# Altium schematic symbol library Resistor.SchLib: 292 symbols
Pins are listed as number, name and electrical type; pins without a type are passive.

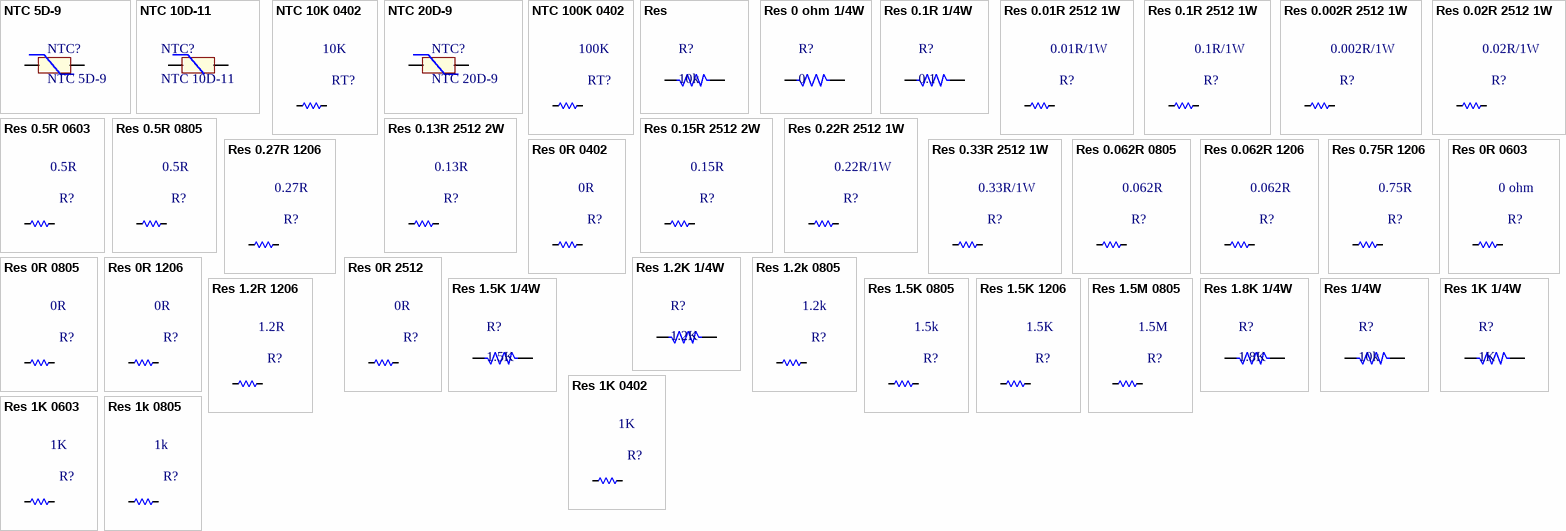
[diagram p0: symbols NTC 5D-9 to Res 1k 0805]

## NTC 5D-9
designator NTC?
NTC Thermistor; Code: 1020-008; ComponentLink1Description: Datasheet; ComponentLink1URL: https://datasheet.lcsc.com/szlcsc/NTC-Thermistor-5R_C69391.pdf
footprint NTC 5D-9
pins: 1, 2

## NTC 10D-11
designator NTC?
NTC Thermistor; Code: N/A
footprint NTC xxD11
pins: 1, 2

## NTC 10K 0402
designator RT?, comment 10K
Resistor SMD 0402; Code: N/A
footprint RES-SMD-0402
pins: 1, 2

## NTC 20D-9
designator NTC?
NTC Thermistor; Code: N/A
footprint NTC 5D-9
pins: 1, 2

## NTC 100K 0402
designator RT?, comment 100K
Resistor SMD 0402; Code: N/A
footprint RES-SMD-0402
pins: 1, 2

## Res
designator R?, comment 10k
Res; Value: R1/4W - 1K
footprint RES_1/4 W
footprint RES-1/2W
footprint RES-1W
footprint RES-5W (R5W , 2 pin, 400 x 950mil)
footprint RES-1/4WD
footprint RES-1/4W-SMALL
footprint RES-1/4W
footprint RES_2W
footprint RES_3W (R2W, 2 pin, 700mil)
footprint RES-SMD-2512 -2010 (Chip Capacitor, Body 3.2x2.5mm, IPC Medium Density)
pins: 1, 2

## Res 0 ohm 1/4W
designator R?, comment 0
Res 1/4W 0 ohm; Designed by: Nhox; Code: N/A
footprint RES-1/4WD
footprint RES-1/4W
pins: 1, 2

## Res 0.1R 1/4W
designator R?, comment 0.1
Res 1/4W 0.1ohm 1%; Designed by: Nhox; Code: N/A
footprint RES_1/4 W 1.2K
pins: 1, 2

## Res 0.01R 2512 1W
designator R?, comment 0.01R/1W
Resistor SMD 2512 1W; Code: N/A
footprint RES-SMD-2512 (Chip Capacitor, Body 3.2x2.5mm, IPC Medium Density)
pins: 1, 2

## Res 0.1R 2512 1W
designator R?, comment 0.1R/1W
Resistor SMD 2512 1W; Code: N/A
footprint RES-SMD-2512 (Chip Capacitor, Body 3.2x2.5mm, IPC Medium Density)
pins: 1, 2

## Res 0.002R 2512 1W
designator R?, comment 0.002R/1W
Resistor SMD 2512 1W; Code: N/A
footprint RES-SMD-2512 (Chip Capacitor, Body 3.2x2.5mm, IPC Medium Density)
pins: 1, 2

## Res 0.02R 2512 1W
designator R?, comment 0.02R/1W
Resistor SMD 2512 1W; Code: N/A
footprint RES-SMD-2512 (Chip Capacitor, Body 3.2x2.5mm, IPC Medium Density)
pins: 1, 2

## Res 0.5R 0603
designator R?, comment 0.5R
Resistor SMD 0603; Code: N/A
footprint RES-SMD-0603
pins: 1, 2

## Res 0.5R 0805
designator R?, comment 0.5R
Resistor SMD 0805; Code: N/A
footprint RES-SMD-0805
pins: 1, 2

## Res 0.13R 2512 2W
designator R?, comment 0.13R
Resistor SMD 2512; Code: N/A; LCSC Part: C395974
footprint RES-SMD-2512 (Chip Capacitor, Body 3.2x2.5mm, IPC Medium Density)
pins: 1, 2

## Res 0.15R 2512 2W
designator R?, comment 0.15R
Resistor SMD 2512; Code: N/A; LCSC Part: C459673
footprint RES-SMD-2512 (Chip Capacitor, Body 3.2x2.5mm, IPC Medium Density)
pins: 1, 2

## Res 0.22R 2512 1W
designator R?, comment 0.22R/1W
Resistor SMD 2512 1W; Code: 1032-005
footprint RES-SMD-2512 (Chip Capacitor, Body 3.2x2.5mm, IPC Medium Density)
pins: 1, 2

## Res 0.27R 1206
designator R?, comment 0.27R
Resistor SMD 1206; Code: 1030-006
footprint RES-SMD-1206
pins: 1, 2

## Res 0.33R 2512 1W
designator R?, comment 0.33R/1W
Resistor SMD 2512 1W; Code: 1032-007
footprint RES-SMD-2512 (Chip Capacitor, Body 3.2x2.5mm, IPC Medium Density)
pins: 1, 2

## Res 0.062R 0805
designator R?, comment 0.062R
Resistor SMD 0805
footprint RES-SMD-0805
pins: 1, 2

## Res 0.062R 1206
designator R?, comment 0.062R
Resistor SMD 1206; Code: 1030-014
footprint RES-SMD-1206
pins: 1, 2

## Res 0.75R 1206
designator R?, comment 0.75R
Resistor SMD 1206; Code: 1030-014
footprint RES-SMD-1206
pins: 1, 2

## Res 0R 0402
designator R?, comment 0R
Resistor SMD 0402; Code: 1022-001
footprint RES-SMD-0402
pins: 1, 2

## Res 0R 0603
designator R?, comment 0 ohm
Resistor SMD 0603; Code: 1028-001
footprint RES-SMD-0603
pins: 1, 2

## Res 0R 0805
designator R?, comment 0R
Resistor SMD 0805; Code: 1024-220
footprint RES-SMD-0805
pins: 1, 2

## Res 0R 1206
designator R?, comment 0R
Resistor SMD 1206; Code: 1030-001
footprint RES-SMD-1206
pins: 1, 2

## Res 0R 2512
designator R?, comment 0R
Resistor SMD 2512, R005, 0 ohm; Code: 1032-001
footprint RES-SMD-2512 (Chip Capacitor, Body 3.2x2.5mm, IPC Medium Density)
pins: 1, 2

## Res 1.2K 1/4W
designator R?, comment 1.2K
Res 1/4W 1.2K 1%; Code: 1001-055; Designed by: TranLuyen
footprint RES_1/4 W 1.2K
pins: 1, 2

## Res 1.2k 0805
designator R?, comment 1.2k
Resistor SMD 0805; Code: 1024-088
footprint RES-SMD-0805
pins: 1, 2

## Res 1.2R 1206
designator R?, comment 1.2R
Resistor SMD 1206; Code: 1030-018
footprint RES-SMD-1206
pins: 1, 2

## Res 1.5K 1/4W
designator R?, comment 1.5K
Res 1/4W 1.5K 1%; Code: 1001-056; Designed by: TranLuyen
footprint RES_1/4 W 1.5K
pins: 1, 2

## Res 1.5K 0805
designator R?, comment 1.5k
Resistor SMD 0805; Code: 1024-090; Value: 1.5k
footprint RES-SMD-0805
pins: 1, 2

## Res 1.5K 1206
designator R?, comment 1.5K
Resistor SMD 1206; Code: 1031-090; Value: 1.5K
footprint RES-SMD-1206
pins: 1, 2

## Res 1.5M 0805
designator R?, comment 1.5M
Resistor SMD 0805; Code: 1024-166
footprint RES-SMD-0805
pins: 1, 2

## Res 1.8K 1/4W
designator R?, comment 1.8K
Res 1/4W 1.8K 1%; Code: 1001-057; Designed by: TranLuyen
footprint RES_1/4 W 1.8K
pins: 1, 2

## Res 1/4W
designator R?, comment 10k
Res 1/4W; Code: N/A
footprint RES_1/4 W
footprint RES-1/4WD
footprint RES-1/4W-SMALL
footprint RES-1/4W
pins: 1, 2

## Res 1K 1/4W
designator R?, comment 1K
Res 1/4W; Designed by: TranLuyen; Code: 1001-054
footprint RES_1/4 W 1K
footprint RES-1/4WD
pins: 1, 2

## Res 1K 0402
designator R?, comment 1K
Resistor SMD 0402; Code: 1022-086
footprint RES-SMD-0402
pins: 1, 2

## Res 1K 0603
designator R?, comment 1K
Resistor SMD 0603; Code: 1028-086
footprint RES-SMD-0603
pins: 1, 2

## Res 1k 0805
designator R?, comment 1k
Resistor SMD 0805; Code: 1024-086
footprint RES-SMD-0805
pins: 1, 2

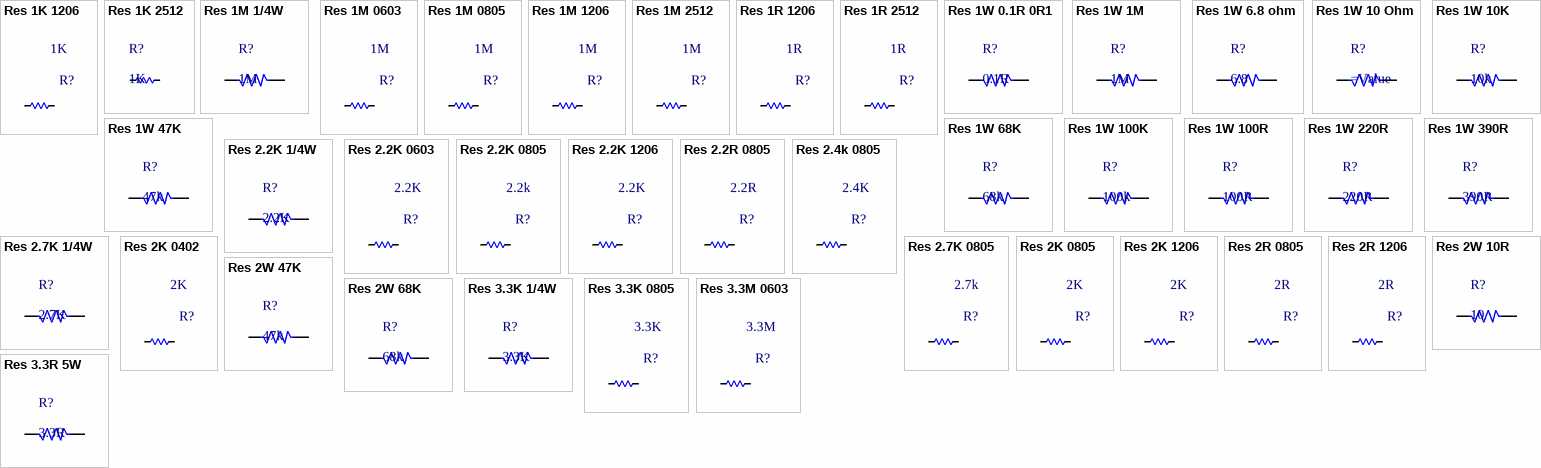
[diagram p1: symbols Res 1K 1206 to Res 3.3R 5W]

## Res 1K 1206
designator R?, comment 1K
Resistor SMD 1206; Code: 1030-086
footprint RES-SMD-1206
pins: 1, 2

## Res 1K 2512
designator R?, comment 1K
RES 2512 1W; Code: 1032-086
footprint RES-SMD-2512 (Chip Capacitor, Body 3.2x2.5mm, IPC Medium Density)
pins: 1, 2

## Res 1M 1/4W
designator R?, comment 1M
Res 1/4W 1M 1%; Code: 1001-098; Designed by: TranLuyen
footprint RES_1/4 W 1M
pins: 1, 2

## Res 1M 0603
designator R?, comment 1M
Resistor SMD 0603; Code: 1028-162
footprint RES-SMD-0603
pins: 1, 2

## Res 1M 0805
designator R?, comment 1M
Resistor SMD 0805; Code: 1024-162
footprint RES-SMD-0805
pins: 1, 2

## Res 1M 1206
designator R?, comment 1M
Resistor SMD 1206; Code: 1030-162; Designed by: Nhox
footprint RES-SMD-1206
pins: 1, 2

## Res 1M 2512
designator R?, comment 1M
Resistor SMD 2512; Designed by: Nhox; Code: N/A
footprint RES-SMD-2512 (Chip Capacitor, Body 3.2x2.5mm, IPC Medium Density)
pins: 1, 2

## Res 1R 1206
designator R?, comment 1R
Resistor SMD 1206; Code: 1030-017
footprint RES-SMD-1206
pins: 1, 2

## Res 1R 2512
designator R?, comment 1R
Resistor SMD 2512; Designed by: Nhox; Code: N/A
footprint RES-SMD-2512 (Chip Capacitor, Body 3.2x2.5mm, IPC Medium Density)
pins: 1, 2

## Res 1W 0.1R 0R1
designator R?, comment 0.1R
Res 1W; Code: N/A
footprint RES 1W AX06 (RESISTOR 1 WATT, AXIAL0.6)
pins: 1, 2

## Res 1W 1M
designator R?, comment 1M
Res 1W; Code: 1006-098; Value: 1M
footprint RES 1W AX06 (RESISTOR 1 WATT, AXIAL0.6)
pins: 1, 2

## Res 1W 6.8 ohm
designator R?, comment 6.8
Res 1W; Code: 1006-022; Value: 6.8
footprint RES 1W AX06 (RESISTOR 1 WATT, AXIAL0.6)
pins: 1, 2

## Res 1W 10 Ohm
designator R?
Res 1W; Code: N/A
footprint RES-1WD
pins: 1, 2

## Res 1W 10K
designator R?, comment 10k
Res 1W; Code: 1005-070
footprint RES 1W AX06 (RESISTOR 1 WATT, AXIAL0.6)
pins: 1, 2

## Res 1W 47K
designator R?, comment 47k
Res 1W; Code: 1005-079
footprint RES 1W AX06 (RESISTOR 1 WATT, AXIAL0.6)
pins: 1, 2

## Res 1W 68K
designator R?, comment 68k
Res 1W; Code: 1005-082
footprint RES 1W AX06 (RESISTOR 1 WATT, AXIAL0.6)
pins: 1, 2

## Res 1W 100K
designator R?, comment 100k
Res 1W; Code: 1005-085
footprint RES 1W AX06 (RESISTOR 1 WATT, AXIAL0.6)
pins: 1, 2

## Res 1W 100R
designator R?, comment 100R
Res 1W DIP; Code: 1005-038
footprint RES 1W AX06 (RESISTOR 1 WATT, AXIAL0.6)
pins: 1, 2

## Res 1W 220R
designator R?, comment 220R
Res 1W DIP; Code: 1005-042
footprint RES 1W AX06 (RESISTOR 1 WATT, AXIAL0.6)
pins: 1, 2

## Res 1W 390R
designator R?, comment 390R
Res 1W DIP; Code: 1005-046
footprint RES 1W AX06 (RESISTOR 1 WATT, AXIAL0.6)
footprint RES-1WD
pins: 1, 2

## Res 2.2K 1/4W
designator R?, comment 2.2K
Res 1/4W 2.2K 1%; Code: 1001-059; Designed by: TranLuyen
footprint RES_1/4 W 2.2K
footprint RES-1/4WD
pins: 1, 2

## Res 2.2K 0603
designator R?, comment 2.2K
Resistor SMD 0603; Code: 1028-094
footprint RES-SMD-0603
pins: 1, 2

## Res 2.2K 0805
designator R?, comment 2.2k
Resistor SMD 0805; Code: 1024-094
footprint RES-SMD-0805
pins: 1, 2

## Res 2.2K 1206
designator R?, comment 2.2K
Resistor SMD 1206; Code: 1030-094
footprint RES-SMD-1206
pins: 1, 2

## Res 2.2R 0805
designator R?, comment 2.2R
Resistor SMD 0805; Code: 1024-022
footprint RES-SMD-0805
pins: 1, 2

## Res 2.4k 0805
designator R?, comment 2.4K
Resistor SMD 0805; Code: 1025-201
footprint RES-SMD-0805
pins: 1, 2

## Res 2.7K 1/4W
designator R?, comment 2.7K
Res 1/4W 2.7KOhm 1%; Code: 1001-060; Designed by: TranLuyen
footprint RES_1/4 W 2.7K
pins: 1, 2

## Res 2.7K 0805
designator R?, comment 2.7k
Resistor SMD 0805; Code: 1024-096
footprint RES-SMD-0805
pins: 1, 2

## Res 2K 0402
designator R?, comment 2K
Resistor SMD 0402; Code: 1022-093
footprint RES-SMD-0402
pins: 1, 2

## Res 2K 0805
designator R?, comment 2K
Resistor SMD 0805; Code: 1024-093
footprint RES-SMD-0805
pins: 1, 2

## Res 2K 1206
designator R?, comment 2K
Resistor SMD 1206; Code: 1031-093; Value: 2K
footprint RES-SMD-1206
pins: 1, 2

## Res 2R 0805
designator R?, comment 2R
Resistor SMD 0805; Code: 1024-021
footprint RES-SMD-0805
pins: 1, 2

## Res 2R 1206
designator R?, comment 2R
Resistor SMD 1206; Code: 1030-021
footprint RES-SMD-1206
pins: 1, 2

## Res 2W 10R
designator R?, comment 10
Res 2W; Code: 1007-024
footprint RES_2W
footprint RES-1WD
pins: 1, 2

## Res 2W 47K
designator R?, comment 47k
Res 2W; Code: 1008-079
footprint RES_2W
pins: 1, 2

## Res 2W 68K
designator R?, comment 68k
Res 2W; Code: 1008-082
footprint RES_2W
pins: 1, 2

## Res 3.3K 1/4W
designator R?, comment 3.3K
Res 1/4W 3.3K 1%; Code: 1001-061; Designed by: TranLuyen
footprint RES_1/4 W 3.3K
pins: 1, 2

## Res 3.3K 0805
designator R?, comment 3.3K
Resistor SMD 0805; Code: 1024-099; Value: 3.3K
footprint RES-SMD-0805
pins: 1, 2

## Res 3.3M 0603
designator R?, comment 3.3M
Resistor SMD 0603; Code: 1028-173
footprint RES-SMD-0603
pins: 1, 2

## Res 3.3R 5W
designator R?, comment 3.3R
Res 3.3R 5W; Code: 1011-018
footprint RES-5W (R5W , 2 pin, 400 x 950mil)
pins: 1, 2

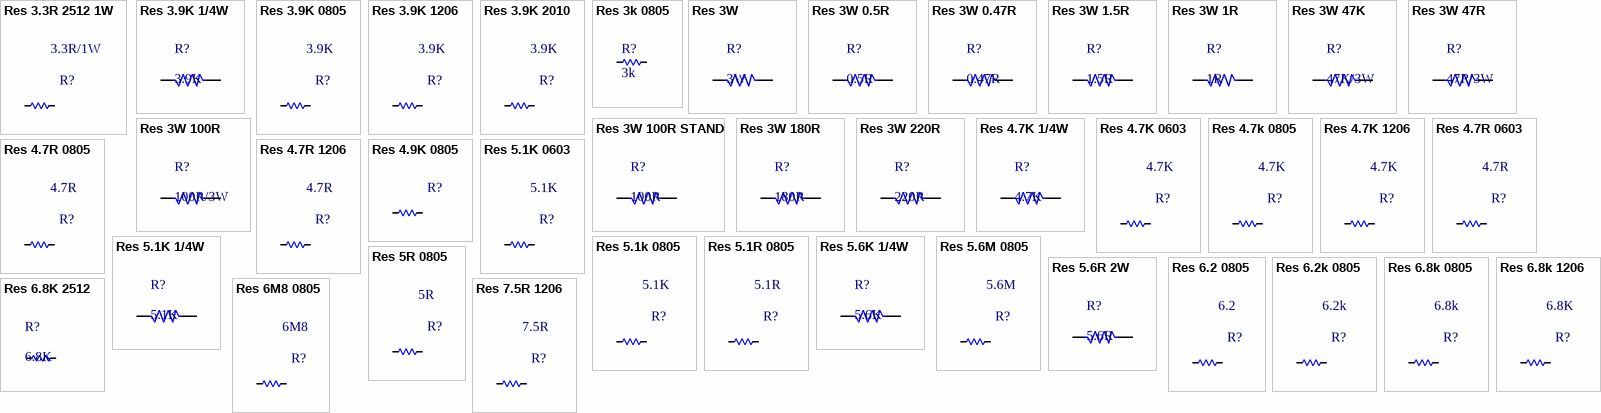
[diagram p2: symbols Res 3.3R 2512 1W to Res 7.5R 1206]

## Res 3.3R 2512 1W
designator R?, comment 3.3R/1W
Resistor SMD 2512 1W; Code: 1032-026
footprint RES-SMD-2512 (Chip Capacitor, Body 3.2x2.5mm, IPC Medium Density)
pins: 1, 2

## Res 3.9K 1/4W
designator R?, comment 3.9K
Res 1/4W 3.9K 1%; Code: 1001-062; Designed by: TranLuyen
footprint RES_1/4 W 3.9K
pins: 1, 2

## Res 3.9K 0805
designator R?, comment 3.9K
Resistor SMD 0805; Code: 1024-101
footprint RES-SMD-0805
pins: 1, 2

## Res 3.9K 1206
designator R?, comment 3.9K
Resistor SMD 1206; Code: 1030-101
footprint RES-SMD-1206
pins: 1, 2

## Res 3.9K 2010
designator R?, comment 3.9K
Resistor SMD 2010; Code: 1026-101
footprint RES-SMD-2010 (Chip Capacitor, Body 3.2x2.5mm, IPC Medium Density)
pins: 1, 2

## Res 3k 0805
designator R?, comment 3k
Resistor SMD 0805; Code: 1024-098; Designed by: TranLuyen
footprint RES-SMD-0805
pins: 1, 2

## Res 3W
designator R?, comment 3W
Res 3W; Value: R1/4W - 1K
footprint RES_3W (R2W, 2 pin, 700mil)
pins: 1, 2

## Res 3W 0.5R
designator R?, comment 0.5R
RES 3W; Code: 1010-106
footprint RES_3W (R2W, 2 pin, 700mil)
pins: 1, 2

## Res 3W 0.47R
designator R?, comment 0.47R
RES 3W; Code: N/A
footprint RES_3W (R2W, 2 pin, 700mil)
pins: 1, 2

## Res 3W 1.5R
designator R?, comment 1.5R
RES 3W; Code: N/A
footprint RES_3W (R2W, 2 pin, 700mil)
pins: 1, 2

## Res 3W 1R
designator R?, comment 1R
RES 3W; Code: 1009-015
footprint RES_3W (R2W, 2 pin, 700mil)
pins: 1, 2

## Res 3W 47K
designator R?, comment 47K/3W
RES 3W; Code: N/A
footprint RES_3W (R2W, 2 pin, 700mil)
pins: 1, 2

## Res 3W 47R
designator R?, comment 47R/3W
RES 3W; Code: 1009-032; Designed by: TranLuyen
footprint RES_3W (R2W, 2 pin, 700mil)
pins: 1, 2

## Res 3W 100R
designator R?, comment 100R/3W
RES 3W; Code: 1009-038; Designed by: TranLuyen
footprint RES_3W (R2W, 2 pin, 700mil)
pins: 1, 2

## Res 3W 100R STAND
designator R?, comment 100R
RES 3W; Code: 1009-038
footprint RES_3W STAND (R3W, 2 pin)
pins: 1, 2

## Res 3W 180R
designator R?, comment 180R
RES 3W; Code: 1009-041
footprint RES_3W STAND (R3W, 2 pin)
footprint RES_3W (R3W, 2 pin)
pins: 1, 2

## Res 3W 220R
designator R?, comment 220R
RES 3W; Code: 1009-042
footprint RES_3W (R2W, 2 pin, 700mil)
pins: 1, 2

## Res 4.7K 1/4W
designator R?, comment 4.7K
Res 1/4W 4.7K 1%; Code: 1001-063; Designed by: TranLuyen
footprint RES_1/4 W 4.7K
footprint RES-1/4WD
pins: 1, 2

## Res 4.7K 0603
designator R?, comment 4.7K
Resistor SMD 0603; Code: 1028-103
footprint RES-SMD-0603
pins: 1, 2

## Res 4.7k 0805
designator R?, comment 4.7K
Resistor SMD 0805; Code: 1024-103
footprint RES-SMD-0805
pins: 1, 2

## Res 4.7K 1206
designator R?, comment 4.7K
Resistor SMD 1206; Code: 1030-103
footprint RES-SMD-1206
pins: 1, 2

## Res 4.7R 0603
designator R?, comment 4.7R
Resistor SMD 0603; Code: N/A
footprint RES-SMD-0603
pins: 1, 2

## Res 4.7R 0805
designator R?, comment 4.7R
Resistor SMD 0805; Code: 1024-030
footprint RES-SMD-0805
pins: 1, 2

## Res 4.7R 1206
designator R?, comment 4.7R
Resistor SMD 1206; Code: 1030-030
footprint RES-SMD-1206
pins: 1, 2

## Res 4.9K 0805
designator R?, comment 4.9K  (value not drawn)
Resistor SMD 0805
footprint RES-SMD-0805
pins: 1, 2

## Res 5.1K 1/4W
designator R?, comment 5.1K
Res 1/4W 5.1K 1%; Code: 1001-064; Designed by: TranLuyen
footprint RES_1/4 W 5.6K
footprint RES-1/4WD
pins: 1, 2

## Res 5.1K 0603
designator R?, comment 5.1K
Resistor SMD 0603; Code: 1028-104
footprint RES-SMD-0603
pins: 1, 2

## Res 5.1k 0805
designator R?, comment 5.1K
Resistor SMD 0805; Code: 1024-104
footprint RES-SMD-0805
pins: 1, 2

## Res 5.1R 0805
designator R?, comment 5.1R
Resistor SMD 0805; Code: 1024-031
footprint RES-SMD-0805
pins: 1, 2

## Res 5.6K 1/4W
designator R?, comment 5.6K
Res 1/4W 5.6K 1%; Code: 1001-065; Designed by: TranLuyen
footprint RES_1/4 W 5.6K
pins: 1, 2

## Res 5.6M 0805
designator R?, comment 5.6M
Resistor SMD 0805; Code: 1024-179
footprint RES-SMD-0805
pins: 1, 2

## Res 5.6R 2W
designator R?, comment 5.6R
Res 2W 2W DIP; Code: N/A
footprint RES_2W
pins: 1, 2

## Res 5R 0805
designator R?, comment 5R
Resistor SMD 0805
footprint RES-SMD-0805
pins: 1, 2

## Res 6.2 0805
designator R?, comment 6.2
Resistor SMD 0805; Code: 1024-033
footprint RES-SMD-0805
pins: 1, 2

## Res 6.2k 0805
designator R?, comment 6.2k
Resistor SMD 0805; Code: 1024-106
footprint RES-SMD-0805
pins: 1, 2

## Res 6.8k 0805
designator R?, comment 6.8k
Resistor SMD 0805; Code: 1024-107
footprint RES-SMD-0805
pins: 1, 2

## Res 6.8k 1206
designator R?, comment 6.8K
Resistor SMD 1206; Code: 1030-107; Value: 6.8K
footprint RES-SMD-1206
pins: 1, 2

## Res 6.8K 2512
designator R?, comment 6.8K
RES 2512 1W; Code: 1032-107
footprint RES-SMD-2512 (Chip Capacitor, Body 3.2x2.5mm, IPC Medium Density)
pins: 1, 2

## Res 6M8 0805
designator R?, comment 6M8
Resistor SMD 0805; Code: 1024-181
footprint RES-SMD-0805
pins: 1, 2

## Res 7.5R 1206
designator R?, comment 7.5R
Resistor SMD 1206; Code: 1030-035; Value: 7.5R
footprint RES-SMD-1206
pins: 1, 2

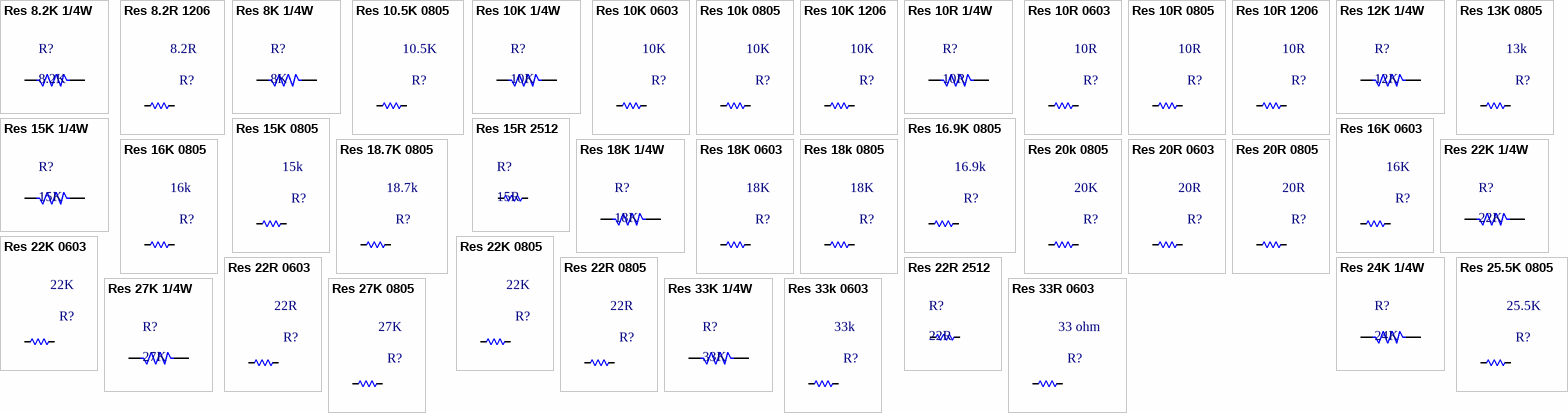
[diagram p3: symbols Res 8.2K 1/4W to Res 33R 0603]

## Res 8.2K 1/4W
designator R?, comment 8.2K
Res 1/4W 8.2K 1%; Code: 1001-068; Designed by: TranLuyen
footprint RES_1/4 W 8.2K
pins: 1, 2

## Res 8.2R 1206
designator R?, comment 8.2R
Resistor SMD 1206; Code: 1030-036; Value: 8.2R
footprint RES-SMD-1206
pins: 1, 2

## Res 8K 1/4W
designator R?, comment 8K
Res 1/4W; Code: N/A
footprint RES_1/4 W 1K
footprint RES-1/4WD
pins: 1, 2

## Res 10.5K 0805
designator R?, comment 10.5K
Resistor SMD 0805; Code: 1025-295
footprint RES-SMD-0805
pins: 1, 2

## Res 10K 1/4W
designator R?, comment 10K
Res 1/4W 10K 1%; Code: 1001-070; Designed by: TranLuyen
footprint RES_1/4 W 10k
pins: 1, 2

## Res 10K 0603
designator R?, comment 10K
Resistor SMD 0603; Code: 1028-111
footprint RES-SMD-0603
pins: 1, 2

## Res 10k 0805
designator R?, comment 10K
Resistor SMD 0805; Code: 1024-111
footprint RES-SMD-0805
pins: 1, 2

## Res 10K 1206
designator R?, comment 10K
Resistor SMD 1206; Code: 1030-111; Designed by: Nhox
footprint RES-SMD-1206
pins: 1, 2

## Res 10R 1/4W
designator R?, comment 10R
Res 1/4W 10R 1%; Code: 1001-024; Designed by: TranLuyen
footprint RES_1/4 W 10R
pins: 1, 2

## Res 10R 0603
designator R?, comment 10R
Resistor SMD 0603; Code: N/A
footprint RES-SMD-0603
pins: 1, 2

## Res 10R 0805
designator R?, comment 10R
Resistor SMD 0805; Code: 1025-038
footprint RES-SMD-0805
pins: 1, 2

## Res 10R 1206
designator R?, comment 10R
Resistor SMD 1206; Code: 1030-038
footprint RES-SMD-1206
pins: 1, 2

## Res 12K 1/4W
designator R?, comment 12K
Res 1/4W 12K 1%; Code: 1001-071; Designed by: TranLuyen
footprint RES_1/4 W 12K
pins: 1, 2

## Res 13K 0805
designator R?, comment 13k
Resistor SMD 0805; Code: 1024-114
footprint RES-SMD-0805
pins: 1, 2

## Res 15K 1/4W
designator R?, comment 15K
Res 1/4W 15K 1%; Code: 1001-072; Designed by: TranLuyen
footprint RES_1/4 W 15K
pins: 1, 2

## Res 15K 0805
designator R?, comment 15k
Resistor SMD 0805; Code: 1024-116
footprint RES-SMD-0805
pins: 1, 2

## Res 15R 2512
designator R?, comment 15R
RES 2512 1W; Code: 1032-042
footprint RES-SMD-2512 (Chip Capacitor, Body 3.2x2.5mm, IPC Medium Density)
pins: 1, 2

## Res 16.9K 0805
designator R?, comment 16.9k
Resistor SMD 0805; Code: 1024-074
footprint RES-SMD-0805
pins: 1, 2

## Res 16K 0603
designator R?, comment 16K
Resistor SMD 0603; Code: N/A
footprint RES-SMD-0603
pins: 1, 2

## Res 16K 0805
designator R?, comment 16k
Resistor SMD 0805; Code: N/A
footprint RES-SMD-0805
pins: 1, 2

## Res 18.7K 0805
designator R?, comment 18.7k
Resistor SMD 0805; Code: 1025-401
footprint RES-SMD-0805
pins: 1, 2

## Res 18K 1/4W
designator R?, comment 18K
Res 1/4W 18K 1%; Code: 1001-073; Designed by: TranLuyen
footprint RES_1/4 W 18K
footprint RES-1/4WD
pins: 1, 2

## Res 18K 0603
designator R?, comment 18K
Resistor SMD 0603; Code: 1028-118
footprint RES-SMD-0603
pins: 1, 2

## Res 18k 0805
designator R?, comment 18K
Resistor SMD 0805; Code: 1024-118
footprint RES-SMD-0805
pins: 1, 2

## Res 20k 0805
designator R?, comment 20K
Resistor SMD 0805; Code: 1024-119
footprint RES-SMD-0805
pins: 1, 2

## Res 20R 0603
designator R?, comment 20R
Resistor SMD 0603; Code: N/A
footprint RES-SMD-0603
pins: 1, 2

## Res 20R 0805
designator R?, comment 20R
Resistor SMD 0805; Code: 1024-045
footprint RES-SMD-0805
pins: 1, 2

## Res 22K 1/4W
designator R?, comment 22K
Res 1/4W 22K; Code: 1001-075; Designed by: TranLuyen
footprint RES_1/4 W 22k
pins: 1, 2

## Res 22K 0603
designator R?, comment 22K
Resistor SMD 0603; Code: 1028-120
footprint RES-SMD-0603
pins: 1, 2

## Res 22K 0805
designator R?, comment 22K
Resistor SMD 0805; Code: 1024-120
footprint RES-SMD-0805
pins: 1, 2

## Res 22R 0603
designator R?, comment 22R
Resistor SMD 0603; Code: 1028-046
footprint RES-SMD-0603
pins: 1, 2

## Res 22R 0805
designator R?, comment 22R
Resistor SMD 0805; Code: 1024-046
footprint RES-SMD-0805
pins: 1, 2

## Res 22R 2512
designator R?, comment 22R
RES 2512 1W; Code: 1032-046
footprint RES-SMD-2512 (Chip Capacitor, Body 3.2x2.5mm, IPC Medium Density)
pins: 1, 2

## Res 24K 1/4W
designator R?, comment 24K
Res 1/4W 24K 1%; Code: 1001-008
footprint RES_1/4 W 1M
footprint RES-1/4WD
pins: 1, 2

## Res 25.5K 0805
designator R?, comment 25.5K
Resistor SMD 0805; Code: 1025-504
footprint RES-SMD-0805
pins: 1, 2

## Res 27K 1/4W
designator R?, comment 27K
Res 1/4W 27K 1%; Code: 1001-076; Designed by: TranLuyen
footprint RES_1/4 W 27K
pins: 1, 2

## Res 27K 0805
designator R?, comment 27K
Resistor SMD 0805; Code: 1024-122
footprint RES-SMD-0805
pins: 1, 2

## Res 33K 1/4W
designator R?, comment 33K
Res 1/4W 33K 1%; Code: 1001-077; Designed by: TranLuyen
footprint RES_1/4 W 33K
pins: 1, 2

## Res 33k 0603
designator R?, comment 33k
Resistor SMD 0603; Code: 1028-124
footprint RES-SMD-0603
pins: 1, 2

## Res 33R 0603
designator R?, comment 33 ohm
Resistor SMD 0603; Code: N/A
footprint RES-SMD-0603
pins: 1, 2

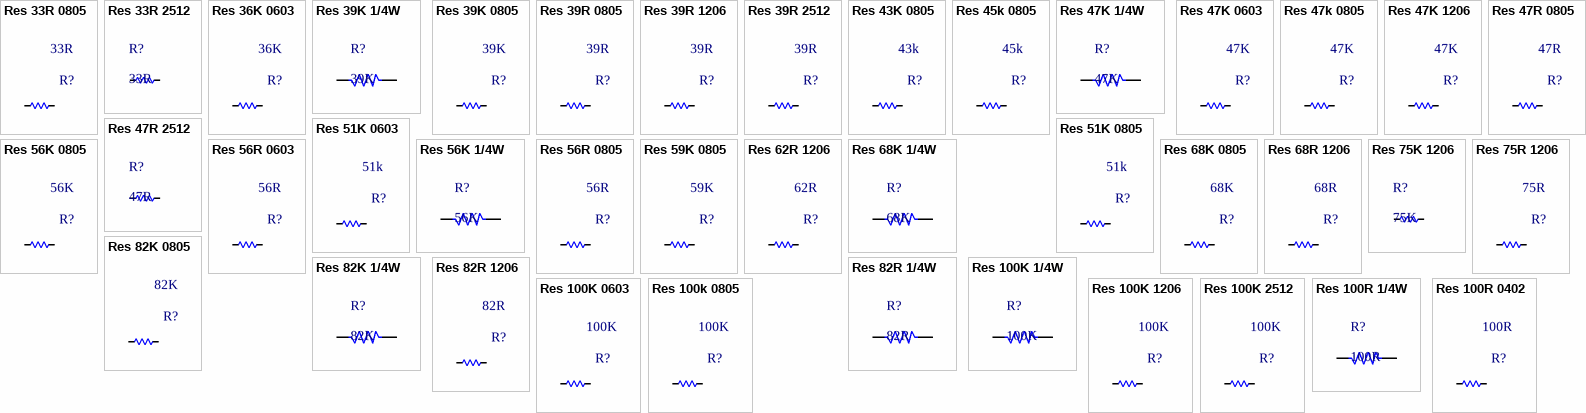
[diagram p4: symbols Res 33R 0805 to Res 100R 0402]

## Res 33R 0805
designator R?, comment 33R
Resistor SMD 0805; Code: N/A
footprint RES-SMD-0805
pins: 1, 2

## Res 33R 2512
designator R?, comment 33R
RES 2512 1W; Code: 1032-050
footprint RES-SMD-2512 (Chip Capacitor, Body 3.2x2.5mm, IPC Medium Density)
pins: 1, 2

## Res 36K 0603
designator R?, comment 36K
Resistor SMD 0603; Code: 1028-125
footprint RES-SMD-0603
pins: 1, 2

## Res 39K 1/4W
designator R?, comment 39K
Res 1/4W 39K 1%; Code: 1001-078; Designed by: TranLuyen
footprint RES_1/4 W 39K
pins: 1, 2

## Res 39K 0805
designator R?, comment 39K
Resistor SMD 0805; Code: 1024-126
footprint RES-SMD-0805
pins: 1, 2

## Res 39R 0805
designator R?, comment 39R
Resistor SMD 0805; Code: 1024-052
footprint RES-SMD-0805
pins: 1, 2

## Res 39R 1206
designator R?, comment 39R
Resistor SMD 1206; Code: 1031-052; Value: 39R
footprint RES-SMD-1206
pins: 1, 2

## Res 39R 2512
designator R?, comment 39R
Resistor SMD 2512; Code: 1032-052; Designed by: Nhox
footprint RES-SMD-2512 (Chip Capacitor, Body 3.2x2.5mm, IPC Medium Density)
pins: 1, 2

## Res 43K 0805
designator R?, comment 43k
Resistor SMD 0805; Code: 1024-127
footprint RES-SMD-0805
pins: 1, 2

## Res 45k 0805
designator R?, comment 45k
Resistor SMD 0805; Code: N/A
footprint RES-SMD-0805
pins: 1, 2

## Res 47K 1/4W
designator R?, comment 47K
Res 1/4W 47K 1%; Code: 1001-079; Designed by: TranLuyen
footprint RES_1/4 W 47K
pins: 1, 2

## Res 47K 0603
designator R?, comment 47K
Resistor SMD 0603; Code: 1028-128
footprint RES-SMD-0603
pins: 1, 2

## Res 47k 0805
designator R?, comment 47K
Resistor SMD 0805; Code: 1024-128
footprint RES-SMD-0805
pins: 1, 2

## Res 47K 1206
designator R?, comment 47K
Resistor SMD 1206; Code: 1030-128
footprint RES-SMD-1206
pins: 1, 2

## Res 47R 0805
designator R?, comment 47R
Resistor SMD 0805; Designed by: Nhox; Code: N/A
footprint RES-SMD-0805
pins: 1, 2

## Res 47R 2512
designator R?, comment 47R
RES 2512 1W; Code: 1032-054
footprint RES-SMD-2512 (Chip Capacitor, Body 3.2x2.5mm, IPC Medium Density)
pins: 1, 2

## Res 51K 0603
designator R?, comment 51k
Resistor SMD 0603; Code: 1028-130
footprint RES-SMD-0603
pins: 1, 2

## Res 51K 0805
designator R?, comment 51k
Resistor SMD 0805; Code: 1025-127
footprint RES-SMD-0805
pins: 1, 2

## Res 56K 1/4W
designator R?, comment 56K
Res 1/4W 56K 1%; Code: 1001-081; Designed by: TranLuyen
footprint RES_1/4 W 56K
pins: 1, 2

## Res 56K 0805
designator R?, comment 56K
Resistor SMD 0805; Code: 1024-131
footprint RES-SMD-0805
pins: 1, 2

## Res 56R 0603
designator R?, comment 56R
Resistor SMD 0603; Code: 1028-057
footprint RES-SMD-0603
pins: 1, 2

## Res 56R 0805
designator R?, comment 56R
Resistor SMD 0805; Code: 1024-057
footprint RES-SMD-0805
pins: 1, 2

## Res 59K 0805
designator R?, comment 59K
Resistor SMD 0805
footprint RES-SMD-0805
pins: 1, 2

## Res 62R 1206
designator R?, comment 62R
Resistor SMD 1206; Code: 1030-058; Value: 62R
footprint RES-SMD-1206
pins: 1, 2

## Res 68K 1/4W
designator R?, comment 68K
Res 1/4W 68K 1%; Code: 1001-082; Designed by: TranLuyen
footprint RES_1/4 W 68K
pins: 1, 2

## Res 68K 0805
designator R?, comment 68K
Resistor SMD 0805; Code: 1024-133
footprint RES-SMD-0805
pins: 1, 2

## Res 68R 1206
designator R?, comment 68R
Resistor SMD 1206; Code: 1030-059
footprint RES-SMD-1206
pins: 1, 2

## Res 75K 1206
designator R?, comment 75K
Res SMD 1206; Code: 1030-134
footprint RES-SMD-1206
pins: 1, 2

## Res 75R 1206
designator R?, comment 75R
Resistor SMD 1206; Code: 1030-060; Value: 75R
footprint RES-SMD-1206
pins: 1, 2

## Res 82K 1/4W
designator R?, comment 82K
Res 1/4W 82K 1%; Code: 1001-084; Designed by: TranLuyen
footprint RES_1/4 W 82K
pins: 1, 2

## Res 82K 0805
designator R?, comment 82K
Resistor SMD 0805
footprint RES-SMD-0805
pins: 1, 2

## Res 82R 1/4W
designator R?, comment 82R
Res 1/4W; Code: N/A
footprint RES_1/4 W 1K
footprint RES-1/4WD
pins: 1, 2

## Res 82R 1206
designator R?, comment 82R
Resistor SMD 1206; Code: 1030-061; Value: 82R
footprint RES-SMD-1206
pins: 1, 2

## Res 100K 1/4W
designator R?, comment 100K
Res 1/4W 100K 1%; Code: 1001-085; Designed by: TranLuyen
footprint RES_1/4 W 100K
footprint RES-1/4WD
pins: 1, 2

## Res 100K 0603
designator R?, comment 100K
Resistor SMD 0603; Code: 1028-137
footprint RES-SMD-0603
pins: 1, 2

## Res 100k 0805
designator R?, comment 100K
Resistor SMD 0805; Code: 1024-137
footprint RES-SMD-0805
pins: 1, 2

## Res 100K 1206
designator R?, comment 100K
Resistor SMD 1206; Code: 1030-137; Designed by: Nhox
footprint RES-SMD-1206
pins: 1, 2

## Res 100K 2512
designator R?, comment 100K
Resistor SMD 2512; Designed by: Nhox; Code: N/A
footprint RES-SMD-2512 (Chip Capacitor, Body 3.2x2.5mm, IPC Medium Density)
pins: 1, 2

## Res 100R 1/4W
designator R?, comment 100R
Res 1/4W 100R 1%; Code: 1001-038; Designed by: TranLuyen
footprint RES_1/4 W 100R
pins: 1, 2

## Res 100R 0402
designator R?, comment 100R
Resistor SMD 0402; Code: 1022-063
footprint RES-SMD-0402
pins: 1, 2

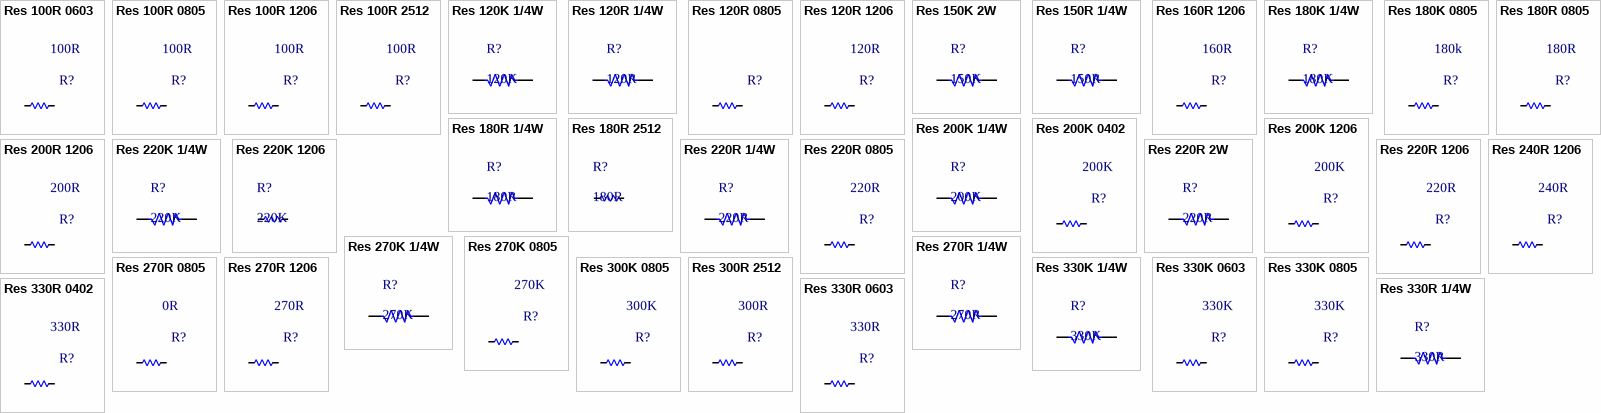
[diagram p5: symbols Res 100R 0603 to Res 330R 0603]

## Res 100R 0603
designator R?, comment 100R
Resistor SMD 0603; Code: 1029-275
footprint RES-SMD-0603
pins: 1, 2

## Res 100R 0805
designator R?, comment 100R
Resistor SMD 0805; Code: 1025-063
footprint RES-SMD-0805
pins: 1, 2

## Res 100R 1206
designator R?, comment 100R
Resistor SMD 1206; Code: 1030-063; Value: 100R
footprint RES-SMD-1206
pins: 1, 2

## Res 100R 2512
designator R?, comment 100R
Resistor SMD 2512; Code: 1033-063
footprint RES-SMD-2512 (Chip Capacitor, Body 3.2x2.5mm, IPC Medium Density)
pins: 1, 2

## Res 120K 1/4W
designator R?, comment 120K
Res 1/4W 120K 1%; Code: 1001-086; Designed by: TranLuyen
footprint RES_1/4 W 120K
pins: 1, 2

## Res 120R 1/4W
designator R?, comment 120R
Res 1/4W 120R 1%; Code: 1001-039; Designed by: TranLuyen
footprint RES_1/4 W 120R
pins: 1, 2

## Res 120R 0805
designator R?
Resistor SMD 0805; Code: 1024-065
footprint RES-SMD-0805
pins: 1, 2

## Res 120R 1206
designator R?, comment 120R
Resistor SMD 1206; Code: 1031-065
footprint RES-SMD-1206
pins: 1, 2

## Res 150K 2W
designator R?, comment 150K
Res; Code: 1008-087; Value: 150K
footprint RES_2W
pins: 1, 2

## Res 150R 1/4W
designator R?, comment 150R
Res 1/4W 150R 1%; Code: 1001-040; Designed by: TranLuyen
footprint RES_1/4 W 150R
pins: 1, 2

## Res 160R 1206
designator R?, comment 160R
Resistor SMD 1206; Code: 1030-068
footprint RES-SMD-1206
pins: 1, 2

## Res 180K 1/4W
designator R?, comment 180K
Res 1/4W 180K 1%; Code: 1001-089; Designed by: TranLuyen
footprint RES_1/4 W 180K
pins: 1, 2

## Res 180K 0805
designator R?, comment 180k
Resistor SMD 0805; Code: 1025-140
footprint RES-SMD-0805
pins: 1, 2

## Res 180R 1/4W
designator R?, comment 180R
Res 1/4W 180R 1%; Code: 1001-041; Designed by: TranLuyen
footprint RES_1/4 W 180R
pins: 1, 2

## Res 180R 0805
designator R?, comment 180R
Resistor SMD 0805; Code: 1024-069
footprint RES-SMD-0805
pins: 1, 2

## Res 180R 2512
designator R?, comment 180R
RES 2512 1W; Code: 1032-069
footprint RES-SMD-2512 (Chip Capacitor, Body 3.2x2.5mm, IPC Medium Density)
pins: 1, 2

## Res 200K 1/4W
designator R?, comment 200K
Res 1/4W; Code: N/A
footprint RES_1/4 W 1K
footprint RES-1/4WD
pins: 1, 2

## Res 200K 0402
designator R?, comment 200K
Resistor SMD 0402; Code: 1022-144
footprint RES-SMD-0402
pins: 1, 2

## Res 200K 1206
designator R?, comment 200K
Resistor SMD 1206; Code: 1030-144
footprint RES-SMD-1206
pins: 1, 2

## Res 200R 1206
designator R?, comment 200R
Resistor SMD 1206; Code: 1030-070
footprint RES-SMD-1206
pins: 1, 2

## Res 220K 1/4W
designator R?, comment 220K
Res 1/4W 220K 1%; Code: 1001-090; Designed by: TranLuyen
footprint RES_1/4 W 220K
pins: 1, 2

## Res 220K 1206
designator R?, comment 220K
Resistor SMD 1206; Code: 1030-145
footprint RES-SMD-1206
pins: 1, 2

## Res 220R 1/4W
designator R?, comment 220R
Res 1/4W 220R 1%; Code: 1001-042; Designed by: TranLuyen
footprint RES_1/4 W 220R
pins: 1, 2

## Res 220R 2W
designator R?, comment 220R
Res; Code: 1007-042; Value: 220R
footprint RES_2W
pins: 1, 2

## Res 220R 0805
designator R?, comment 220R
Resistor SMD 0805; Code: 1025-071
footprint RES-SMD-0805
pins: 1, 2

## Res 220R 1206
designator R?, comment 220R
Resistor SMD 1206; Code: 1030-071
footprint RES-SMD-1206
pins: 1, 2

## Res 240R 1206
designator R?, comment 240R
Resistor SMD 1206; Code: 1031-189
footprint RES-SMD-1206
pins: 1, 2

## Res 270K 1/4W
designator R?, comment 270K
Res 1/4W 270K 1%; Code: 1001-091; Designed by: TranLuyen
footprint RES_1/4 W 270K
pins: 1, 2

## Res 270K 0805
designator R?, comment 270K
Resistor SMD 0805; Code: 1025-144
footprint RES-SMD-0805
pins: 1, 2

## Res 270R 1/4W
designator R?, comment 270R
Res 1/4W 270R 1%; Code: 1001-043; Designed by: TranLuyen
footprint RES_1/4 W 270R
pins: 1, 2

## Res 270R 0805
designator R?, comment 0R
Resistor SMD 0805; Code: 1024-072
footprint RES-SMD-0805
pins: 1, 2

## Res 270R 1206
designator R?, comment 270R
Resistor SMD 1206; Code: 1030-072
footprint RES-SMD-1206
pins: 1, 2

## Res 300K 0805
designator R?, comment 300K
Resistor SMD 0805; Code: 1024-148
footprint RES-SMD-0805
pins: 1, 2

## Res 300R 2512
designator R?, comment 300R
Resistor SMD 2512; Code: 1032-073
footprint RES-SMD-2512 (Chip Capacitor, Body 3.2x2.5mm, IPC Medium Density)
pins: 1, 2

## Res 330K 1/4W
designator R?, comment 330K
Res 1/4W 330K 1%; Code: 1001-092; Designed by: TranLuyen
footprint RES_1/4 W 330K
pins: 1, 2

## Res 330K 0603
designator R?, comment 330K
Resistor SMD 0603; Code: 1028-149
footprint RES-SMD-0603
pins: 1, 2

## Res 330K 0805
designator R?, comment 330K
Resistor SMD 0805; Code: 1024-149
footprint RES-SMD-0805
pins: 1, 2

## Res 330R 1/4W
designator R?, comment 330R
Res 1/4W 330R 1%; Code: 1001-045; Designed by: TranLuyen
footprint RES_1/4 W 330R
pins: 1, 2

## Res 330R 0402
designator R?, comment 330R
Resistor SMD 0402; Code: 1022-074
footprint RES-SMD-0402
pins: 1, 2

## Res 330R 0603
designator R?, comment 330R
Resistor SMD 0603; Code: 1028-074
footprint RES-SMD-0603
pins: 1, 2

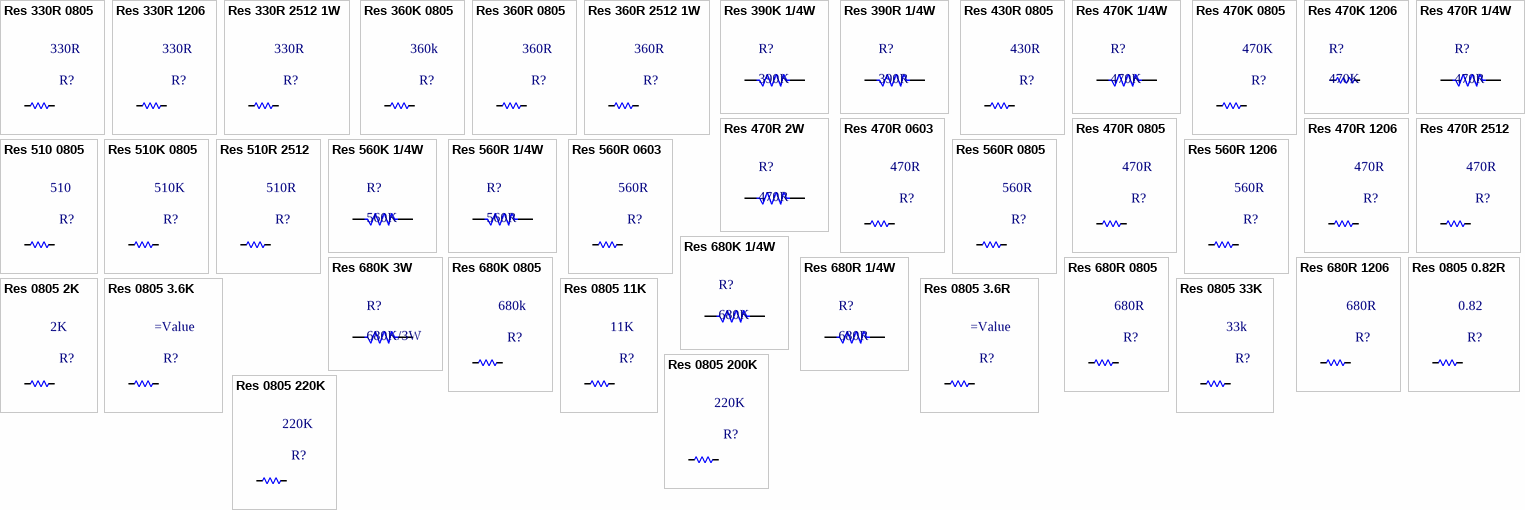
[diagram p6: symbols Res 330R 0805 to Res 0805 220K]

## Res 330R 0805
designator R?, comment 330R
Resistor SMD 0805; Code: 1024-074
footprint RES-SMD-0805
pins: 1, 2

## Res 330R 1206
designator R?, comment 330R
Resistor SMD 1206; Code: 1030-074
footprint RES-SMD-1206
pins: 1, 2

## Res 330R 2512 1W
designator R?, comment 330R
Resistor SMD 2512 1W; Designed by: Nhox; Code: N/A
footprint RES-SMD-2512 (Chip Capacitor, Body 3.2x2.5mm, IPC Medium Density)
pins: 1, 2

## Res 360K 0805
designator R?, comment 360k
Resistor SMD 0805; Code: 1024-150
footprint RES-SMD-0805
pins: 1, 2

## Res 360R 0805
designator R?, comment 360R
Resistor SMD 0805; Code: 1024-075
footprint RES-SMD-0805
pins: 1, 2

## Res 360R 2512 1W
designator R?, comment 360R
Resistor SMD 2512 1W; Code: 1032-075; Designed by: Nhox
footprint RES-SMD-2512 (Chip Capacitor, Body 3.2x2.5mm, IPC Medium Density)
pins: 1, 2

## Res 390K 1/4W
designator R?, comment 390K
Res 1/4W 390K 1%; Code: 1001-093; Designed by: TranLuyen
footprint RES_1/4 W 390K
pins: 1, 2

## Res 390R 1/4W
designator R?, comment 390R
Res 1/4W 390R 1%; Code: 1001-046; Designed by: TranLuyen
footprint RES_1/4 W 390R
pins: 1, 2

## Res 430R 0805
designator R?, comment 430R
Resistor SMD 0805; Code: 1024-077
footprint RES-SMD-0805
pins: 1, 2

## Res 470K 1/4W
designator R?, comment 470K
Res 1/4W 470K 1%; Code: 1001-094; Designed by: TranLuyen
footprint RES_1/4 W 470K
pins: 1, 2

## Res 470K 0805
designator R?, comment 470K
Resistor SMD 0805; Code: 1024-154
footprint RES-SMD-0805
pins: 1, 2

## Res 470K 1206
designator R?, comment 470K
Res 1/4W 470K; Code: 1030-154
footprint RES-SMD-1206
pins: 1, 2

## Res 470R 1/4W
designator R?, comment 470R
Res 1/4W 470R 1%; Code: 1001-047; Designed by: TranLuyen
footprint RES_1/4 W 470R
footprint RES-1/4WD
pins: 1, 2

## Res 470R 2W
designator R?, comment 470R
Res 2W DIP; Code: 1007-047
footprint RES_2W
pins: 1, 2

## Res 470R 0603
designator R?, comment 470R
Resistor SMD 0603; Code: 1028-078
footprint RES-SMD-0603
pins: 1, 2

## Res 470R 0805
designator R?, comment 470R
Resistor SMD 0805; Code: 1024-078; Value: 470R
footprint RES-SMD-0805
pins: 1, 2

## Res 470R 1206
designator R?, comment 470R
Resistor SMD 1206; Code: 1030-063; Value: 470R
footprint RES-SMD-1206
pins: 1, 2

## Res 470R 2512
designator R?, comment 470R
Resistor SMD 2512; Code: 1032-078
footprint RES-SMD-2512 (Chip Capacitor, Body 3.2x2.5mm, IPC Medium Density)
pins: 1, 2

## Res 510 0805
designator R?, comment 510
Resistor SMD 0805; Code: 1024-079
footprint RES-SMD-0805
pins: 1, 2

## Res 510K 0805
designator R?, comment 510K
Resistor SMD 0805; Code: 1024-155
footprint RES-SMD-0805
pins: 1, 2

## Res 510R 2512
designator R?, comment 510R
Resistor SMD 2512; Code: 1032-079
footprint RES-SMD-2512 (Chip Capacitor, Body 3.2x2.5mm, IPC Medium Density)
pins: 1, 2

## Res 560K 1/4W
designator R?, comment 560K
Res 1/4W 560K 1%; Code: 1001-095; Designed by: TranLuyen
footprint RES_1/4 W 560K
pins: 1, 2

## Res 560R 1/4W
designator R?, comment 560R
Res 1/4W 560R 1%; Code: 1001-048; Designed by: TranLuyen
footprint RES_1/4 W 560R
pins: 1, 2

## Res 560R 0603
designator R?, comment 560R
Resistor SMD 0603; Code: N/A
footprint RES-SMD-0603
pins: 1, 2

## Res 560R 0805
designator R?, comment 560R
Resistor SMD 0805; Code: 1024-080
footprint RES-SMD-0805
pins: 1, 2

## Res 560R 1206
designator R?, comment 560R
Resistor SMD 1206; Code: 1030-080
footprint RES-SMD-1206
pins: 1, 2

## Res 680K 1/4W
designator R?, comment 680K
Res 1/4W 680K 1%; Code: 1001-096; Designed by: TranLuyen
footprint RES_1/4 W 680K
pins: 1, 2

## Res 680K 3W
designator R?, comment 680K/3W
RES 3W; Code: 1009-096; Designed by: TranLuyen
footprint RES_3W (R2W, 2 pin, 700mil)
pins: 1, 2

## Res 680K 0805
designator R?, comment 680k
Resistor SMD 0805; Code: 1024-158
footprint RES-SMD-0805
pins: 1, 2

## Res 680R 1/4W
designator R?, comment 680R
Res 1/4W 680R 1%; Code: 1001-050; Designed by: TranLuyen
footprint RES_1/4 W 680R
pins: 1, 2

## Res 680R 0805
designator R?, comment 680R
Resistor SMD 0805; Code: 1024-082; Value: 680R
footprint RES-SMD-0805
pins: 1, 2

## Res 680R 1206
designator R?, comment 680R
Resistor SMD 1206; Code: 1030-082; Value: 680R
footprint RES-SMD-1206
pins: 1, 2

## Res 0805 0.82R
designator R?, comment 0.82
Resistor SMD 0805; Code: 1024-015
footprint RES-SMD-0805
pins: 1, 2

## Res 0805 2K
designator R?, comment 2K
Resistor SMD 0805; Code: 1024-093; Value: 2K
footprint RES-SMD-0805
pins: 1, 2

## Res 0805 3.6K
designator R?
Resistor SMD 0805
footprint RES-SMD-0805
pins: 1, 2

## Res 0805 3.6R
designator R?
Resistor SMD 0805; Code: 1025-027
footprint RES-SMD-0805
pins: 1, 2

## Res 0805 11K
designator R?, comment 11K
Resistor SMD 0805; Code: 1024-112
footprint RES-SMD-0805
pins: 1, 2

## Res 0805 33K
designator R?, comment 33k
Resistor SMD 0805; Code: 1024-124
footprint RES-SMD-0805
pins: 1, 2

## Res 0805 200K
designator R?, comment 220K
Resistor SMD 0805; Value: 220K
footprint RES-SMD-0805
pins: 1, 2

## Res 0805 220K
designator R?, comment 220K
Resistor SMD 0805; Code: 1024-145
footprint RES-SMD-0805
pins: 1, 2

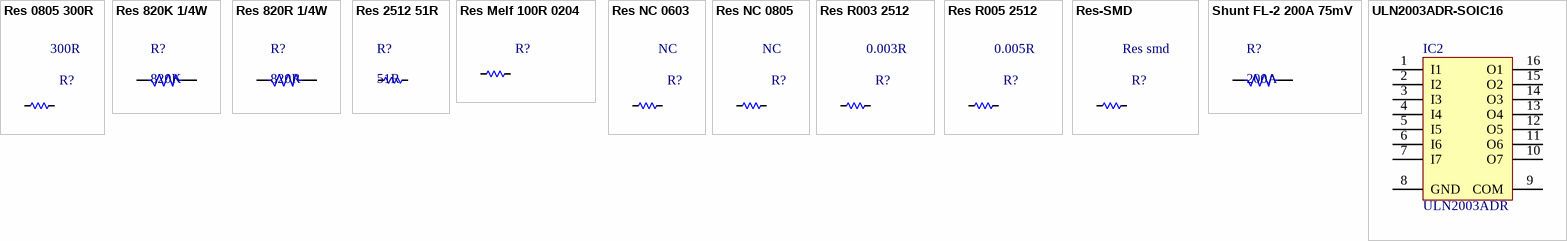
[diagram p7: symbols Res 0805 300R to ULN2003ADR-SOIC16]

## Res 0805 300R
designator R?, comment 300R
Resistor SMD 0805; Code: 1024-073
footprint RES-SMD-0805
pins: 1, 2

## Res 820K 1/4W
designator R?, comment 820K
Res 1/4W 820K 1%; Code: 1001-097; Designed by: TranLuyen
footprint RES_1/4 W 820K
pins: 1, 2

## Res 820R 1/4W
designator R?, comment 820R
Res 1/4W 820R 1%; Code: 1001-052; Designed by: TranLuyen
footprint RES_1/4 W 820R
pins: 1, 2

## Res 2512 51R
designator R?, comment 51R
RES 2512 1W; Code: 1032-056
footprint RES-SMD-2512 (Chip Capacitor, Body 3.2x2.5mm, IPC Medium Density)
pins: 1, 2

## Res Melf 100R 0204
designator R?, comment 100R  (value not drawn)
250mW Metal Film Resistors 200V ±50ppm/℃ ±1% 100Ω MELF Chip Resistor - Surface Mount ROHS; Code: N/A
footprint res melf 0204 (LMERW330)
pins: 1, 2

## Res NC 0603
designator R?, comment NC  (no BOM)
Resistor SMD 0603; Code: 1028-078
footprint RES-SMD-0603
pins: 1, 2

## Res NC 0805
designator R?, comment NC  (no BOM)
Resistor SMD 0805
footprint RES-SMD-0805
pins: 1, 2

## Res R003 2512
designator R?, comment 0.003R
Resistor SMD 2512, R003, 0.003 ohm; Code: N/A
footprint RES-SMD-2512 (Chip Capacitor, Body 3.2x2.5mm, IPC Medium Density)
pins: 1, 2

## Res R005 2512
designator R?, comment 0.005R
Resistor SMD 2512, R005, 0.005 ohm; Code: N/A
footprint RES-SMD-2512 (Chip Capacitor, Body 3.2x2.5mm, IPC Medium Density)
pins: 1, 2

## Res-SMD
designator R?, comment Res smd
Resistor SMD
footprint RES-SMD-0101
footprint RES-SMD-0201
footprint RES-SMD-0603
footprint RES-SMD-0805
footprint RES-SMD-1206
footprint RES-SMD-1210 (Chip Capacitor, Body 3.2x2.5mm, IPC Medium Density)
footprint RES-SMD-1812 (Chip Capacitor, Body 3.2x2.5mm, IPC Medium Density)
footprint RES-SMD-2010 (Chip Capacitor, Body 3.2x2.5mm, IPC Medium Density)
footprint RES-SMD-2512 (Chip Capacitor, Body 3.2x2.5mm, IPC Medium Density)
pins: 1, 2

## Shunt FL-2 200A 75mV
designator R?, comment 200A
FL-2, Class 0.5, Dòng 200A, 75mV; Code: N/A
footprint Shunt FL-2 200A 75mV
pins: 1, 2

## ULN2003ADR-SOIC16
designator IC2, comment ULN2003ADR
High-Voltage, High-Current Darlington Array. SOIC16-9.9x3.9mm, 1.27mm; Code: 1704-015; Designed by: TranLuyen
footprint SO_16 (SOP, SOIC, 3.9mm width, 1.27mm pitch,)
pins: 1 I1, 2 I2, 3 I3, 4 I4, 5 I5, 6 I6, 7 I7, 8 GND (power), 9 COM, 10 O7 (oc), 11 O6 (oc), 12 O5 (oc), 13 O4 (oc), 14 O3 (oc), 15 O2 (oc), 16 O1 (oc)